# Altium footprint library PcbLib1.PcbLib: 4 footprints
Each footprint in its own frame and in the unit in brackets; x right, y up, seen from the top. Pads: shape width x height; smd on the part's side, far side on the other; paste and mask are expansions set on the pad; w line width, h text height; cw(c..) or ccw(c..) is an arc to the next point about the centre after c.
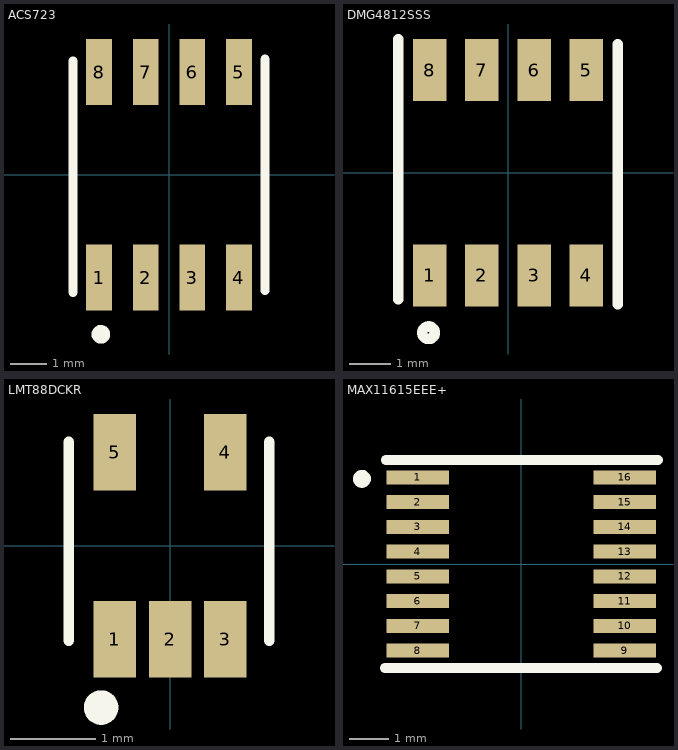
[diagram p0: the footprints below, top view; thin cyan lines are the x and y axes]

## ACS723 [mm]
pads (8):
  rect 0.7x1.8 smd: 1(-1.905,-2.8) 2(-0.635,-2.8) 3(0.635,-2.8) 4(1.905,-2.8) 5(1.905,2.8) 6(0.635,2.8) 7(-0.635,2.8) 8(-1.905,2.8)
Top Overlay:
  circle w0.254: c-1.854,-4.343 r0.127
  lines w0.254: -2.616,-3.2 -2.616,3.099 ; 2.616,-3.15 2.616,3.15
3D body "sop127p-6mm-8 v2.step": height 1.65, standoff 0, extent -2.45,-2.924 2.45,2.976

## DMG4812SSS [mm]
pads (8):
  rect 0.81x1.51 smd: 1(-1.905,-2.495) 2(-0.635,-2.495) 3(0.635,-2.495) 4(1.905,-2.495) 5(1.905,2.495) 6(0.635,2.495) 7(-0.635,2.495) 8(-1.905,2.495)
Top Overlay:
  circle w0.254: c-1.93,-3.886 r0.152
  lines w0.254: -2.667,-3.073 -2.667,3.251 ; 2.667,-3.2 2.667,3.124
3D body "SO8.stp": height 1.7, standoff 0, extent -2.477,-3.073 2.527,3.125

## LMT88DCKR [mm] "SENSOR ANALOG -55C-130C SC70-5"
pads (5):
  rect 0.5x0.9 smd: 1(-0.65,-1.1) 2(0,-1.1) 3(0.65,-1.1) 4(0.65,1.1) 5(-0.65,1.1)
Top Overlay:
  circle w0.254: c-0.813,-1.905 r0.076
  lines w0.127: -1.194,-1.118 -1.194,1.219 ; 1.168,-1.118 1.168,1.219
3D body "DCK5.stp": height 1.07, standoff -0.03, extent -1.08,-1.168 1.08,1.22

## MAX11615EEE+ [mil]
pads (16):
  rect 63x14 smd: 1(-104.5,87.5) 2(-104.5,62.5) 3(-104.5,37.5) 4(-104.5,12.5) 5(-104.5,-12.5) 6(-104.5,-37.5) 7(-104.5,-62.5) 8(-104.5,-87.5) 9(104.5,-87.5) 10(104.5,-62.5) 11(104.5,-37.5) 12(104.5,-12.5) 13(104.5,12.5) 14(104.5,37.5) 15(104.5,62.5) 16(104.5,87.5)
Top Overlay:
  circle w10: c-161,86 r4
  lines w10: -138,-105 137,-105 ; -137,105 138,105
3D body: height 10, standoff 0, extent -10,-15 -10,-15
3D body "NA__NA__MAXIM INTEGRATED__NA__21-0055H_16--3DModel-Eagle-2522.STEP": height 68.1, standoff -1, extent -121.99,-98 122.01,98
3D body: height 10, standoff 0, extent -65,-135 -65,-135